# Altium schematic symbol library SS3P6L-M386A.SchLib: 1 symbol
Pins are listed as number, name and electrical type; pins without a type are passive.

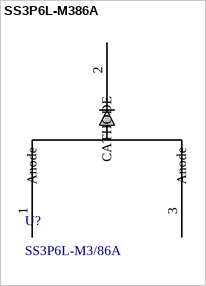
[diagram p0: symbol SS3P6L-M386A]

## SS3P6L-M386A
designator U?, comment SS3P6L-M3/86A
3A, 60V SMPC SKY RECT.; Manufacturer_Name: Vishay; Copyright: Copyright (C) 2025 Ultra Librarian. All rights reserved.; Manufacturer_Part_Number: SS3P6L-M3/86A; RefDes: RefDes; Type: Type
footprint SS3P6L-M386A_VIS
pins: 1 Anode, 2 CATHODE, 3 Anode